# Altium footprint library Connectors.PcbLib: 69 footprints (part 2 of 5)
Each footprint in its own frame and in the unit in brackets; x right, y up, seen from the top. Pads: shape width x height; smd on the part's side, far side on the other; paste and mask are expansions set on the pad; w line width, h text height; cw(c..) or ccw(c..) is an arc to the next point about the centre after c.
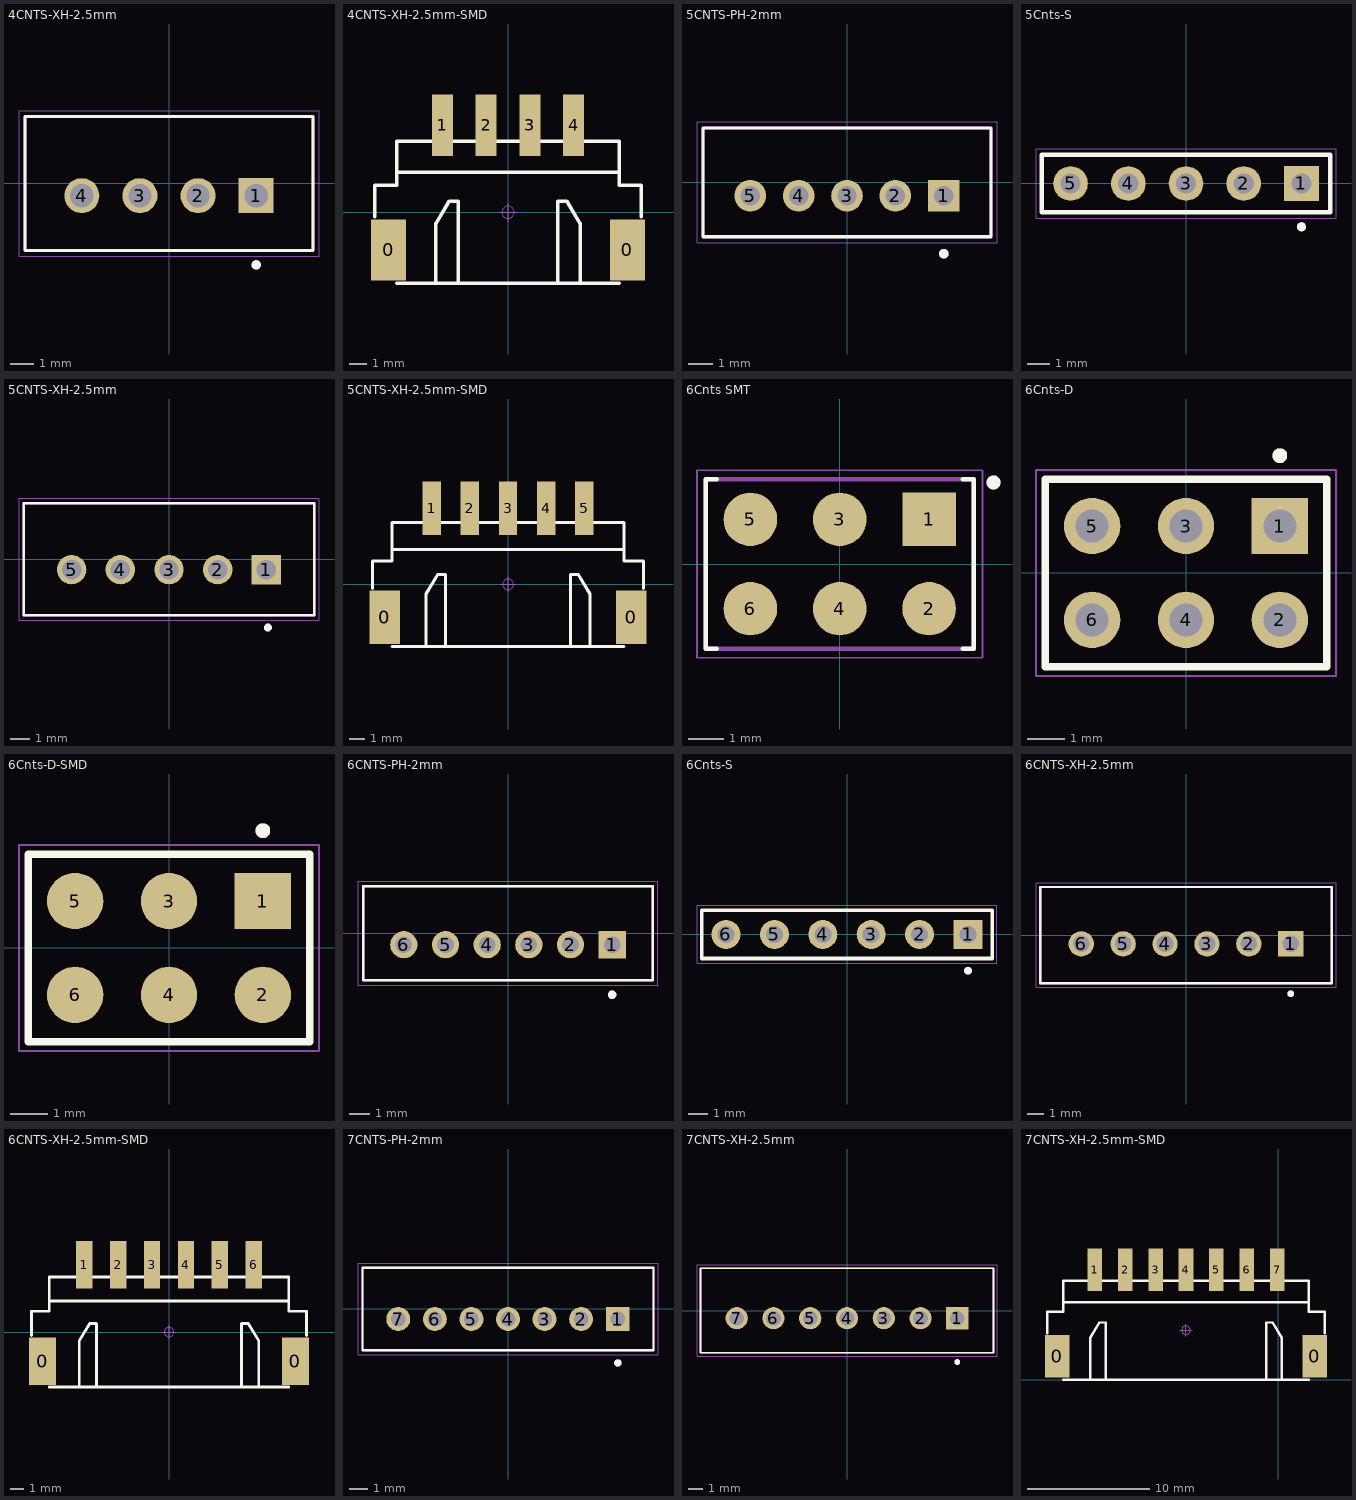
[diagram p1: the footprints below, top view; thin cyan lines are the x and y axes]

## 4CNTS-XH-2.5mm [mm] "JST_B2B-4CNTS-XH-2.5mm"
height 7
pads (4):
  rect 1.508x1.508 hole 1: 1(3.75,-0.525)
  round 1.508 hole 1: 2(1.25,-0.525) 3(-1.25,-0.525) 4(-3.75,-0.525)
Top Overlay:
  circle w0.2: c3.75,-3.5 r0.1
  lines w0.127: -6.2,-2.875 6.2,-2.875 6.2,2.875 -6.2,2.875 -6.2,-2.875
Mechanical 13:
  circle w0.2: c3.75,-3.5 r0.1
  lines w0.127: -6.2,-2.875 6.2,-2.875 6.2,2.875 -6.2,2.875 -6.2,-2.875
Mechanical 15:
  lines w0.05: -6.45,-3.125 6.45,-3.125 6.45,3.125 -6.45,3.125 -6.45,-3.125
3D body "step_temp.STEP": height 7.03, standoff -3.37, extent -6.2,-2.875 6.2,2.875

## 4CNTS-XH-2.5mm-SMD [mm] "4pin 2515connecor 2.54 mm pitch male smd"
pads (6):
  rect 2x3.5 smd: 0(-6.827,-2.15) 0(6.827,-2.15)
  rect 1.2x3.5 smd: 1(-3.75,4.981) 2(-1.25,4.981) 3(1.25,4.981) 4(3.75,4.981)
Top Overlay:
  lines w0.2: -7.62,-0.254 -7.62,1.536 -6.35,1.536 -6.35,4.064 6.35,4.064 6.35,1.536 7.62,1.536 7.62,-0.254 ; -6.35,-4.064 6.35,-4.064 ; -6.35,2.286 6.35,2.286 ; -4.12,-4.064 -4.12,-0.634 -3.358,0.636 -2.85,0.636 -2.85,-4.064 ; 2.85,-4.064 2.85,0.636 3.358,0.636 4.12,-0.634 4.12,-4.064
Mechanical 15:
  circle w0.05: c0,0 r0.35
  lines w0.05: -0.5,0 0.5,0 ; 0,-0.5 0,0.5
3D body "XH2.54-WS-4P.STEP": height 6.05, standoff -0.01, extent -7.5,-4 7.5,6.418

## 5CNTS-PH-2mm [mm] "JST_B2B-5CNTS-PH-2mm"
pads (5):
  rect 1.308x1.308 hole 0.8: 1(4,-0.55)
  round 1.308 hole 0.8: 2(2,-0.55) 3(0,-0.55) 4(-2,-0.55) 5(-4,-0.55)
Top Overlay:
  circle w0.2: c4,-2.95 r0.1
  lines w0.127: -5.95,-2.25 -5.95,2.25 5.95,2.25 5.95,-2.25 -5.95,-2.25
Mechanical 13:
  circle w0.2: c4,-2.95 r0.1
  lines w0.127: -5.95,-2.25 5.95,-2.25 5.95,2.25 -5.95,2.25 -5.95,-2.25
Mechanical 15:
  lines w0.05: -6.2,-2.5 6.2,-2.5 6.2,2.5 -6.2,2.5 -6.2,-2.5
3D body "B5B-PH-K-S--3DModel-STEP-510211.STEP": height 6.03, standoff -3.37, extent -5.95,-2.25 5.95,2.25

## 5Cnts-S [mil] "5Cnts-S"
pads (5):
  rect 60x60 hole 35: 1(200,0)
  round 60 hole 35: 2(100,0) 3(0,0) 4(-100,0) 5(-200,0)
Top Overlay:
  circle w7.87: c200,-75 r3.94
  lines w7.87: -250,-50 -250,50 250,50 250,-50 -250,-50
Mechanical 13:
  circle w7.87: c200,-75 r3.94
  lines w3.94: -250,-50 -250,50 ; -250,-50 250,-50 ; -250,-50 -250,50 ; -250,50 250,50 ; -250,50 250,50 ; 250,-50 250,50 ; 250,-50 250,50
Mechanical 15:
  lines w1.97: -259.84,-59.84 -259.84,59.84 259.84,59.84 259.84,-59.84 -259.84,-59.84
3D body "5Cnts-S.step": height 337.2, standoff -77.76, extent -250,-50 250,50

## 5CNTS-XH-2.5mm [mm] "JST_B2B-5CNTS-XH-2.5mm"
height 7
pads (5):
  rect 1.508x1.508 hole 1: 1(5,-0.525)
  round 1.508 hole 1: 2(2.5,-0.525) 3(0,-0.525) 4(-2.5,-0.525) 5(-5,-0.525)
Top Overlay:
  circle w0.2: c5.08,-3.5 r0.1
  lines w0.127: -7.45,-2.875 7.45,-2.875 7.45,2.875 -7.45,2.875 -7.45,-2.875
Mechanical 13:
  circle w0.2: c5.08,-3.5 r0.1
  lines w0.127: -7.45,-2.875 7.45,-2.875 7.45,2.875 -7.45,2.875 -7.45,-2.875
Mechanical 15:
  lines w0.05: -7.7,-3.125 7.7,-3.125 7.7,3.125 -7.7,3.125 -7.7,-3.125
3D body "step_temp.STEP": height 7.03, standoff -3.37, extent -7.45,-2.875 7.45,2.875

## 5CNTS-XH-2.5mm-SMD [mm] "5pin 2515connecor 2.54 mm pitch male smd"
pads (7):
  rect 2x3.5 smd: 0(-8.077,-2.15) 0(8.077,-2.15)
  rect 1.2x3.5 smd: 1(-5,4.981) 2(-2.5,4.981) 3(0,4.981) 4(2.5,4.981) 5(5,4.981)
Top Overlay:
  lines w0.2: -8.89,-0.254 -8.89,1.536 -7.6,1.536 -7.6,4.064 7.6,4.064 7.6,1.536 8.89,1.536 8.89,-0.254 ; -7.6,-4.064 7.6,-4.064 ; -7.6,2.286 7.6,2.286 ; -5.37,-4.064 -5.37,-0.634 -4.608,0.636 -4.1,0.636 -4.1,-4.064 ; 4.1,-4.064 4.1,0.636 4.608,0.636 5.37,-0.634 5.37,-4.064
Mechanical 15:
  circle w0.05: c0,0 r0.35
  lines w0.05: -0.5,0 0.5,0 ; 0,-0.5 0,0.5
3D body "XH2.54-WS-5P.STEP": height 6.05, standoff -0.01, extent -8.75,-4 8.75,6.418

## 6Cnts SMT [mil] "6Cnts SMT"
pads (6):
  rect 60x60 smd: 1(100,50)
  round 60 smd: 2(100,-50) 3(0,50) 4(0,-50) 5(-100,50) 6(-100,-50)
Top Overlay:
  circle w7.87: c172.17,91.3 r3.94
  lines w5: -137.6,-95.08 -150,-95.08 -150,95.08 -137.6,95.08 ; 137.6,-95.08 150,-95.08 150,95.08 137.6,95.08
Mechanical 13:
  circle w7.87: c172.17,91.3 r3.94
  lines w5: -150,-95.08 150,-95.08 150,95.08 -150,95.08 -150,-95.08
Mechanical 15:
  lines w1.97: -159.84,-105 -159.84,105 159.84,105 159.84,-105 -159.84,-105
3D body "6Cnts SMT.STEP": height 324.87, standoff 2.04, extent -142.13,-95.08 142.13,95.08

## 6Cnts-D [mil] "6Cnts-D"
pads (6):
  rect 60x60 hole 35: 1(100,50)
  round 60 hole 35: 2(100,-50) 3(0,50) 4(0,-50) 5(-100,50) 6(-100,-50)
Top Overlay:
  circle w7.87: c100,125 r3.94
  lines w7.87: -150,-100 -150,100 150,100 150,-100 -150,-100
Mechanical 13:
  circle w7.87: c100,125 r3.94
  lines w3.94: -150,-100 150,-100 150,100 -150,100 -150,-100
Mechanical 15:
  lines w1.97: -159.84,-109.84 159.84,-109.84 159.84,109.84 -159.84,109.84 -159.84,-109.84
3D body "6Cnts-D.step": height 337.2, standoff -77.76, extent -150,-98.43 150,98.43

## 6Cnts-D-SMD [mil] "6Cnts-D-SMD"
pads (6):
  rect 60x60 smd: 1(100,50)
  round 60 smd: 2(100,-50) 3(0,50) 4(0,-50) 5(-100,50) 6(-100,-50)
Top Overlay:
  circle w7.87: c100,125 r3.94
  lines w7.87: -150,-100 -150,100 150,100 150,-100 -150,-100
Mechanical 13:
  circle w7.87: c100,125 r3.94
  lines w3.94: -150,-100 150,-100 150,100 -150,100 -150,-100
Mechanical 15:
  lines w1.97: -159.84,-109.84 159.84,-109.84 159.84,109.84 -159.84,109.84 -159.84,-109.84
3D body "6Cnts-D.step": height 416.22, standoff 1.26, extent -150,-98.43 150,98.43

## 6CNTS-PH-2mm [mm] "JST_B2B-6CNTS-PH-2mm"
pads (6):
  rect 1.308x1.308 hole 0.8: 1(5,-0.55)
  round 1.308 hole 0.8: 2(3,-0.55) 3(1,-0.55) 4(-1,-0.55) 5(-3,-0.55) 6(-5,-0.55)
Top Overlay:
  circle w0.2: c5,-2.95 r0.1
  lines w0.127: -6.95,-2.25 -6.95,2.25 6.95,2.25 6.95,-2.25 -6.95,-2.25
Mechanical 13:
  circle w0.2: c5,-2.95 r0.1
  lines w0.127: -6.95,-2.25 6.95,-2.25 6.95,2.25 -6.95,2.25 -6.95,-2.25
Mechanical 15:
  lines w0.05: -7.2,-2.5 7.2,-2.5 7.2,2.5 -7.2,2.5 -7.2,-2.5
3D body "step_temp.STEP": height 6.03, standoff -3.37, extent -6.95,-2.25 6.95,2.25

## 6Cnts-S [mil] "6Cnts-S"
pads (6):
  rect 60x60 hole 35: 1(250,0)
  round 60 hole 35: 2(150,0) 3(50,0) 4(-50,0) 5(-150,0) 6(-250,0)
Top Overlay:
  circle w7.87: c250,-75 r3.94
  lines w7.87: -300,-50 300,-50 300,50 -300,50 -300,-50
Mechanical 13:
  circle w7.87: c250,-75 r3.94
  lines w3.94: -300,-50 300,-50 300,50 -300,50 -300,-50
Mechanical 15:
  lines w1.97: -309.84,-59.84 309.84,-59.84 309.84,59.84 -309.84,59.84 -309.84,-59.84
3D body "6Cnts-S.step": height 337.2, standoff -77.76, extent -300,-50 300,50

## 6CNTS-XH-2.5mm [mm] "JST_B2B-6CNTS-XH-2.5mm"
height 7
pads (6):
  rect 1.508x1.508 hole 1: 1(6.25,-0.525)
  round 1.508 hole 1: 2(3.75,-0.525) 3(1.25,-0.525) 4(-1.25,-0.525) 5(-3.75,-0.525) 6(-6.25,-0.525)
Top Overlay:
  circle w0.2: c6.25,-3.5 r0.1
  lines w0.127: -8.7,-2.875 8.7,-2.875 8.7,2.875 -8.7,2.875 -8.7,-2.875
Mechanical 13:
  circle w0.2: c6.25,-3.5 r0.1
  lines w0.127: -8.7,-2.875 8.7,-2.875 8.7,2.875 -8.7,2.875 -8.7,-2.875
Mechanical 15:
  lines w0.05: -8.95,-3.125 8.95,-3.125 8.95,3.125 -8.95,3.125 -8.95,-3.125
3D body "step_temp.STEP": height 7.03, standoff -3.37, extent -8.7,-2.875 8.7,2.875

## 6CNTS-XH-2.5mm-SMD [mm] "6pin 2515connecor 2.54 mm pitch male smd"
pads (8):
  rect 2x3.5 smd: 0(-9.327,-2.15) 0(9.327,-2.15)
  rect 1.2x3.5 smd: 1(-6.25,4.981) 2(-3.75,4.981) 3(-1.25,4.981) 4(1.25,4.981) 5(3.75,4.981) 6(6.25,4.981)
Top Overlay:
  lines w0.2: -10.16,-0.254 -10.16,1.536 -8.85,1.536 -8.85,4.064 8.85,4.064 8.85,1.536 10.16,1.536 10.16,-0.254 ; -8.85,-4.064 8.85,-4.064 ; -8.85,2.286 8.85,2.286 ; -6.62,-4.064 -6.62,-0.634 -5.858,0.636 -5.35,0.636 -5.35,-4.064 ; 5.35,-4.064 5.35,0.636 5.858,0.636 6.62,-0.634 6.62,-4.064
Mechanical 15:
  circle w0.05: c0,0 r0.35
  lines w0.05: -0.5,0 0.5,0 ; 0,-0.5 0,0.5
3D body "XH2.54-WS-6P.STEP": height 6.05, standoff -0.01, extent -10,-4 10,6.418

## 7CNTS-PH-2mm [mm] "JST_B2B-7CNTS-PH-2mm"
pads (7):
  rect 1.308x1.308 hole 0.8: 1(6,-0.55)
  round 1.308 hole 0.8: 2(4,-0.55) 3(2,-0.55) 4(0,-0.55) 5(-2,-0.55) 6(-4,-0.55) 7(-6,-0.55)
Top Overlay:
  circle w0.2: c6,-2.95 r0.1
  lines w0.127: -7.95,-2.25 -7.95,2.25 7.95,2.25 7.95,-2.25 -7.95,-2.25
Mechanical 13:
  circle w0.2: c6,-2.95 r0.1
  lines w0.127: -7.95,-2.25 7.95,-2.25 7.95,2.25 -7.95,2.25 -7.95,-2.25
Mechanical 15:
  lines w0.05: -8.2,-2.5 8.2,-2.5 8.2,2.5 -8.2,2.5 -8.2,-2.5
3D body "step_temp.STEP": height 6.03, standoff -3.37, extent -7.95,-2.25 7.95,2.25

## 7CNTS-XH-2.5mm [mm] "JST_B2B-7CNTS-XH-2.5mm"
height 7
pads (7):
  rect 1.508x1.508 hole 1: 1(7.5,-0.525)
  round 1.508 hole 1: 2(5,-0.525) 3(2.5,-0.525) 4(0,-0.525) 5(-2.5,-0.525) 6(-5,-0.525) 7(-7.5,-0.525)
Top Overlay:
  circle w0.2: c7.5,-3.5 r0.1
  lines w0.127: -9.95,-2.875 9.95,-2.875 9.95,2.875 -9.95,2.875 -9.95,-2.875
Mechanical 13:
  circle w0.2: c7.5,-3.5 r0.1
  lines w0.127: -9.95,-2.875 9.95,-2.875 9.95,2.875 -9.95,2.875 -9.95,-2.875
Mechanical 15:
  lines w0.05: -10.2,-3.125 10.2,-3.125 10.2,3.125 -10.2,3.125 -10.2,-3.125
3D body "step_temp.STEP": height 7.03, standoff -3.37, extent -9.95,-2.875 9.95,2.875

## 7CNTS-XH-2.5mm-SMD [mm] "7pin 2515connecor 2.54 mm pitch male smd"
pads (9):
  rect 2x3.5 smd: 0(-18.177,1.914) 0(2.977,1.914)
  rect 1.2x3.5 smd: 1(-15.1,9.045) 2(-12.6,9.045) 3(-10.1,9.045) 4(-7.6,9.045) 5(-5.1,9.045) 6(-2.6,9.045) 7(-0.1,9.045)
Top Overlay:
  lines w0.2: -19.01,3.81 -19.01,5.6 -17.7,5.6 -17.7,8.128 2.5,8.128 2.5,5.6 3.81,5.6 3.81,3.81 ; -17.7,0 2.5,0 ; -17.7,6.35 2.5,6.35 ; -15.47,0 -15.47,3.43 -14.708,4.7 -14.2,4.7 -14.2,0 ; -1,0 -1,4.7 -0.492,4.7 0.27,3.43 0.27,0
Mechanical 15:
  circle w0.05: c-7.6,4.064 r0.35
  lines w0.05: -8.1,4.064 -7.1,4.064 ; -7.6,3.564 -7.6,4.564
3D body "XH2.54-WS-7P.STEP": height 6.05, standoff -0.01, extent -18.85,0.064 3.65,10.482